# Altium integrated library Res-1206.IntLib: 1 symbol
Pins are listed as number, name and electrical type; pins without a type are passive.

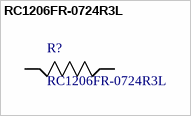
[diagram p0: symbol RC1206FR-0724R3L]

## RC1206FR-0724R3L
designator R?
/ RC Series 1206 0.25 W 24.3 Ohms 1% Â±100 ppm/Â°C SMT Thick Film Chip Resistor /; MF: Yageo; MP: RC1206FR-0724R3L; Package: 1206 Yageo; Price: None; Availability: Unavailable; SnapEDA_Link: https://www.snapeda.com/parts/RC1206FR-0724R3L/Yageo/view-part/?ref=snap; Value: *
footprint RESC3216X06N (Chip Resistor, 2-Leads, Body 3.20x1.60mm, IPC Medium Density)
pins: 1, 2